# Altium schematic symbol library TLV70433DBVR.SchLib: 1 symbol
Pins are listed as number, name and electrical type; pins without a type are passive.

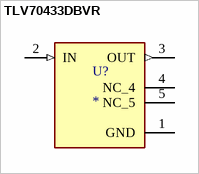
[diagram p0: symbol TLV70433DBVR]

## TLV70433DBVR
designator U?
150-mA 24-V ultra-low-IQ low-dropout (LDO) voltage regulator; MF: Texas Instruments; MP: TLV70433DBVR; SnapEDA_Link: https://www.snapeda.com/parts/TLV70433DBVR/Texas+Instruments/view-part/?ref=snap; Package: SOT-23-5 Texas Instruments; Value: *; Check_prices: https://www.snapeda.com/parts/TLV70433DBVR/Texas+Instruments/view-part/?ref=eda
footprint SOT95P280X145-5N
pins: 1 GND (power), 2 IN (in), 3 OUT (out), 4 NC_4, 5 NC_5